# Altium footprint library 2.11-TQFP封装.PcbLib: 71 footprints (part 2 of 5)
Each footprint in its own frame and in the unit in brackets; x right, y up, seen from the top. Pads: shape width x height; smd on the part's side, far side on the other; paste and mask are expansions set on the pad; w line width, h text height; cw(c..) or ccw(c..) is an arc to the next point about the centre after c.
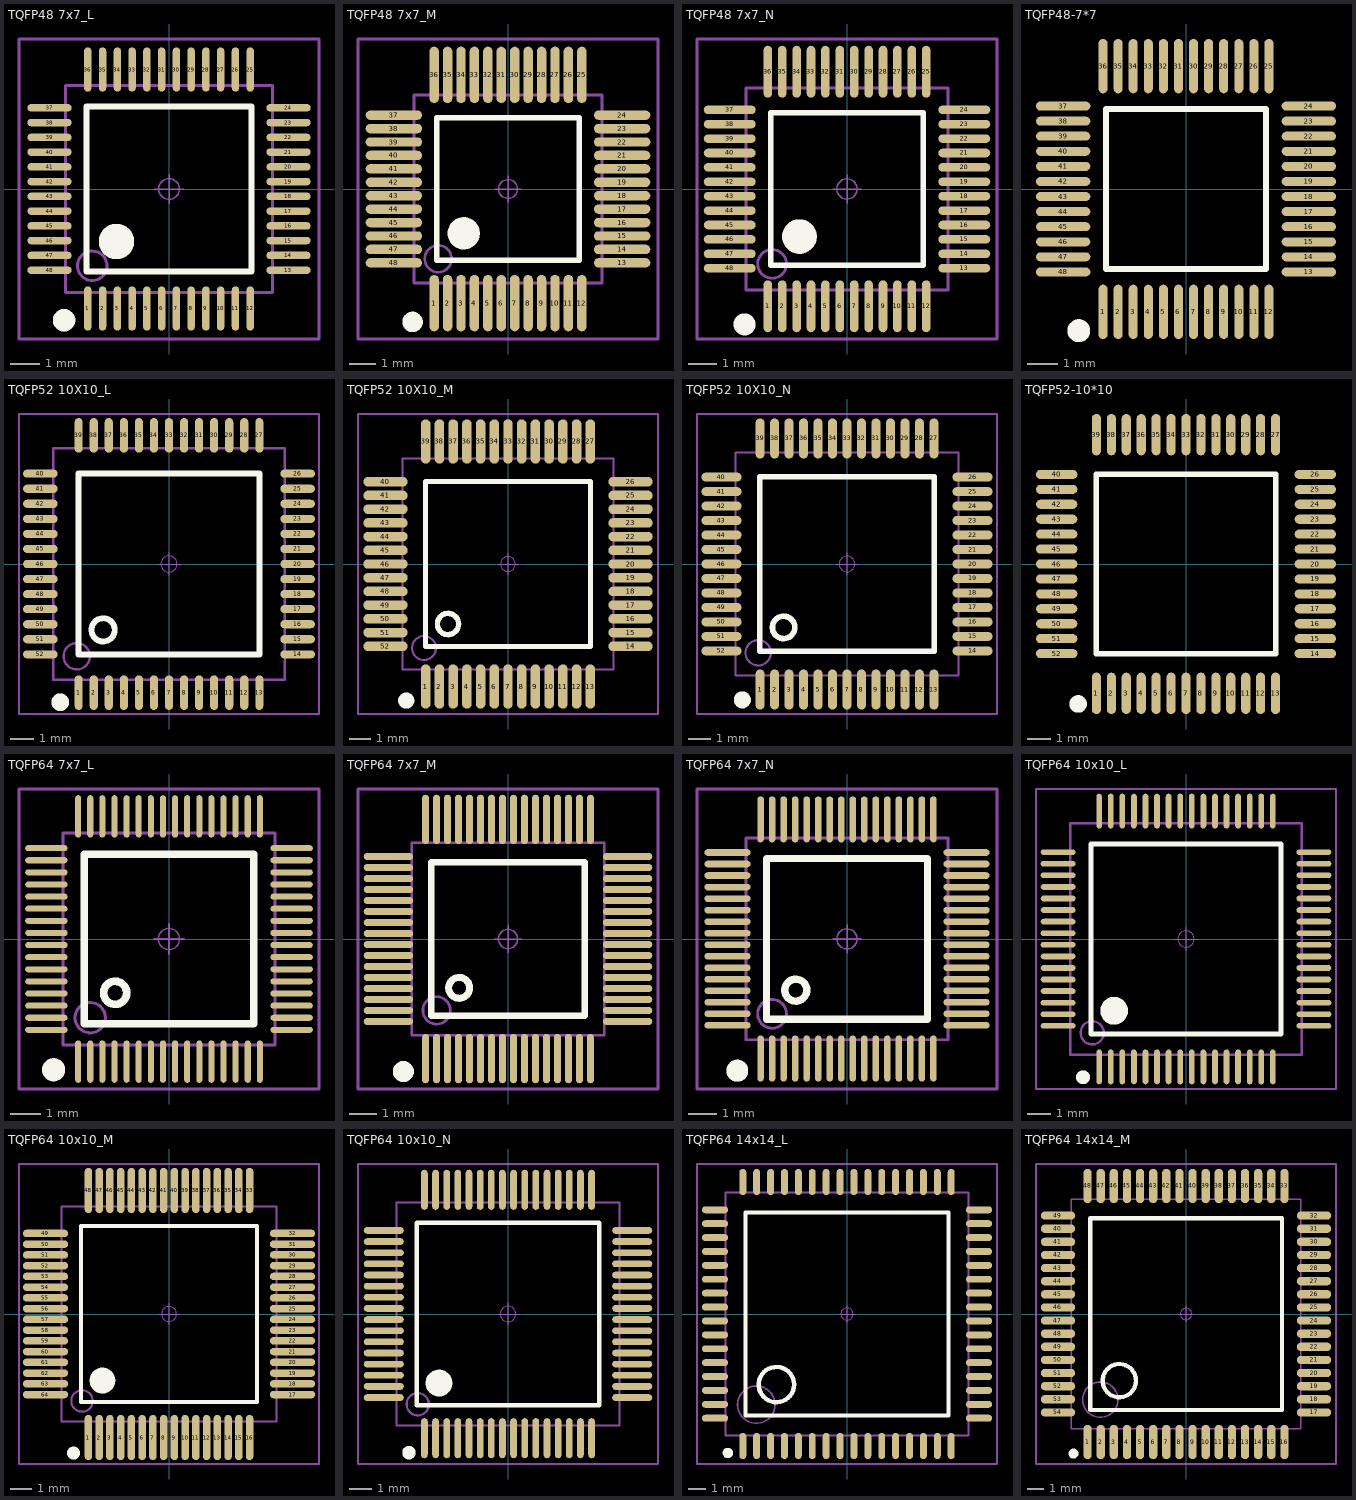
[diagram p1: the footprints below, top view; thin cyan lines are the x and y axes]

## TQFP48 7x7_L [mm] "48脚，体宽：7x7mm, 脚距：0.5mm"
height 1.6
pads (48):
  oval 0.25x1.5 smd: 1(-2.75,-4.046) 2(-2.25,-4.046) 3(-1.75,-4.046) 4(-1.25,-4.046) 5(-0.75,-4.046) 6(-0.25,-4.046) 7(0.25,-4.046) 8(0.75,-4.046) 9(1.25,-4.046) 10(1.75,-4.046) 11(2.25,-4.046) 12(2.75,-4.046) 25(2.75,4.046) 26(2.25,4.046) 27(1.75,4.046) 28(1.25,4.046) 29(0.75,4.046) 30(0.25,4.046) 31(-0.25,4.046) 32(-0.75,4.046) 33(-1.25,4.046) 34(-1.75,4.046) 35(-2.25,4.046) 36(-2.75,4.046)
  oval 1.5x0.25 smd: 13(4.046,-2.75) 14(4.046,-2.25) 15(4.046,-1.75) 16(4.046,-1.25) 17(4.046,-0.75) 18(4.046,-0.25) 19(4.046,0.25) 20(4.046,0.75) 21(4.046,1.25) 22(4.046,1.75) 23(4.046,2.25) 24(4.046,2.75) 37(-4.046,2.75) 38(-4.046,2.25) 39(-4.046,1.75) 40(-4.046,1.25) 41(-4.046,0.75) 42(-4.046,0.25) 43(-4.046,-0.25) 44(-4.046,-0.75) 45(-4.046,-1.25) 46(-4.046,-1.75) 47(-4.046,-2.25) 48(-4.046,-2.75)
Top Overlay:
  circle w0.6: c-1.778,-1.778 r0.3
  circle w0.508: c-3.556,-4.445 r0.127
  lines w0.2: -2.794,-2.794 2.794,-2.794 2.794,2.794 -2.794,2.794 -2.794,-2.794
Mechanical 13:
  circle w0.1: c-2.6,-2.6 r0.5
  lines w0.1: -3.5,-3.5 3.5,-3.5 3.5,3.5 -3.5,3.5 -3.5,-3.5
Mechanical 15:
  circle w0.05: c0,0 r0.35
  lines w0.05: -0.5,0 0.5,0 ; 0,-0.5 0,0.5
  lines w0.1: -5.08,-5.08 5.08,-5.08 5.08,5.08 -5.08,5.08 -5.08,-5.08
3D body "TQFP48 7x7.STEP": height 1.05, standoff 0, extent -4.502,-4.502 4.502,4.502

## TQFP48 7x7_M [mm] "48脚，体宽：7x7mm, 脚距：0.5mm  淘宝ID:黄晶宝石"
height 1.6
pads (48):
  oval 0.35x2.1 smd: 1(-2.75,-4.251) 2(-2.25,-4.251) 3(-1.75,-4.251) 4(-1.25,-4.251) 5(-0.75,-4.251) 6(-0.25,-4.251) 7(0.25,-4.251) 8(0.75,-4.251) 9(1.25,-4.251) 10(1.75,-4.251) 11(2.25,-4.251) 12(2.75,-4.251) 25(2.75,4.251) 26(2.25,4.251) 27(1.75,4.251) 28(1.25,4.251) 29(0.75,4.251) 30(0.25,4.251) 31(-0.25,4.251) 32(-0.75,4.251) 33(-1.25,4.251) 34(-1.75,4.251) 35(-2.25,4.251) 36(-2.75,4.251)
  oval 2.1x0.35 smd: 13(4.251,-2.75) 14(4.251,-2.25) 15(4.251,-1.75) 16(4.251,-1.25) 17(4.251,-0.75) 18(4.251,-0.25) 19(4.251,0.25) 20(4.251,0.75) 21(4.251,1.25) 22(4.251,1.75) 23(4.251,2.25) 24(4.251,2.75) 37(-4.251,2.75) 38(-4.251,2.25) 39(-4.251,1.75) 40(-4.251,1.25) 41(-4.251,0.75) 42(-4.251,0.25) 43(-4.251,-0.25) 44(-4.251,-0.75) 45(-4.251,-1.25) 46(-4.251,-1.75) 47(-4.251,-2.25) 48(-4.251,-2.75)
Top Overlay:
  circle w0.508: c-3.556,-4.953 r0.127
  circle w0.6: c-1.65,-1.65 r0.3
  lines w0.2: -2.65,-2.65 2.65,-2.65 2.65,2.65 -2.65,2.65 -2.65,-2.65
Mechanical 13:
  circle w0.1: c-2.6,-2.6 r0.5
  lines w0.1: -3.5,-3.5 3.5,-3.5 3.5,3.5 -3.5,3.5 -3.5,-3.5
Mechanical 15:
  circle w0.05: c0,0 r0.35
  lines w0.05: -0.5,0 0.5,0 ; 0,-0.5 0,0.5
  lines w0.1: -5.588,-5.588 5.588,-5.588 5.588,5.588 -5.588,5.588 -5.588,-5.588
3D body "TQFP48 7x7.STEP": height 1.05, standoff 0, extent -4.502,-4.502 4.502,4.502

## TQFP48 7x7_N [mm] "48脚，体宽：7x7mm, 脚距：0.5mm"
height 1.6
pads (48):
  oval 0.3x1.8 smd: 1(-2.75,-4.073) 2(-2.25,-4.073) 3(-1.75,-4.073) 4(-1.25,-4.073) 5(-0.75,-4.073) 6(-0.25,-4.073) 7(0.25,-4.073) 8(0.75,-4.073) 9(1.25,-4.073) 10(1.75,-4.073) 11(2.25,-4.073) 12(2.75,-4.073) 25(2.75,4.073) 26(2.25,4.073) 27(1.75,4.073) 28(1.25,4.073) 29(0.75,4.073) 30(0.25,4.073) 31(-0.25,4.073) 32(-0.75,4.073) 33(-1.25,4.073) 34(-1.75,4.073) 35(-2.25,4.073) 36(-2.75,4.073)
  oval 1.8x0.3 smd: 13(4.073,-2.75) 14(4.073,-2.25) 15(4.073,-1.75) 16(4.073,-1.25) 17(4.073,-0.75) 18(4.073,-0.25) 19(4.073,0.25) 20(4.073,0.75) 21(4.073,1.25) 22(4.073,1.75) 23(4.073,2.25) 24(4.073,2.75) 37(-4.073,2.75) 38(-4.073,2.25) 39(-4.073,1.75) 40(-4.073,1.25) 41(-4.073,0.75) 42(-4.073,0.25) 43(-4.073,-0.25) 44(-4.073,-0.75) 45(-4.073,-1.25) 46(-4.073,-1.75) 47(-4.073,-2.25) 48(-4.073,-2.75)
Top Overlay:
  circle w0.508: c-3.556,-4.699 r0.127
  circle w0.6: c-1.65,-1.65 r0.3
  lines w0.2: -2.65,-2.65 -2.65,2.65 2.65,2.65 2.65,-2.65 -2.65,-2.65
Mechanical 13:
  circle w0.1: c-2.6,-2.6 r0.5
  lines w0.1: -3.5,-3.5 -3.5,3.5 3.5,3.5 3.5,-3.5 -3.5,-3.5
Mechanical 15:
  circle w0.05: c0,0 r0.35
  lines w0.05: -0.5,0 0.5,0 ; 0,-0.5 0,0.5
  lines w0.1: -5.207,-5.207 -5.207,5.207 5.207,5.207 5.207,-5.207 -5.207,-5.207
3D body "TQFP48 7x7.STEP": height 1.05, standoff 0, extent -4.502,-4.502 4.502,4.502

## TQFP48-7*7 [mm] "7x7mm, 0.5mm       封装库来自淘宝卖家 ID：黄晶宝石"
pads (48):
  oval 0.3x1.8 smd: 1(-2.75,-4.073) 2(-2.25,-4.073) 3(-1.75,-4.073) 4(-1.25,-4.073) 5(-0.75,-4.073) 6(-0.25,-4.073) 7(0.25,-4.073) 8(0.75,-4.073) 9(1.25,-4.073) 10(1.75,-4.073) 11(2.25,-4.073) 12(2.75,-4.073) 25(2.75,4.073) 26(2.25,4.073) 27(1.75,4.073) 28(1.25,4.073) 29(0.75,4.073) 30(0.25,4.073) 31(-0.25,4.073) 32(-0.75,4.073) 33(-1.25,4.073) 34(-1.75,4.073) 35(-2.25,4.073) 36(-2.75,4.073)
  oval 1.8x0.3 smd: 13(4.073,-2.75) 14(4.073,-2.25) 15(4.073,-1.75) 16(4.073,-1.25) 17(4.073,-0.75) 18(4.073,-0.25) 19(4.073,0.25) 20(4.073,0.75) 21(4.073,1.25) 22(4.073,1.75) 23(4.073,2.25) 24(4.073,2.75) 37(-4.073,2.75) 38(-4.073,2.25) 39(-4.073,1.75) 40(-4.073,1.25) 41(-4.073,0.75) 42(-4.073,0.25) 43(-4.073,-0.25) 44(-4.073,-0.75) 45(-4.073,-1.25) 46(-4.073,-1.75) 47(-4.073,-2.25) 48(-4.073,-2.75)
Top Overlay:
  circle w0.508: c-3.556,-4.699 r0.127
  lines w0.2: -2.65,-2.65 -2.65,2.65 2.65,2.65 2.65,-2.65 -2.65,-2.65
3D body "TQFP48_7x7.STEP": height 1.05, standoff 0, extent -4.502,-4.502 4.502,4.502

## TQFP52 10X10_L [mm] "52脚，体宽：10x10mm, 脚距：0.65mm  淘宝ID:黄晶宝石"
pads (52):
  oval 0.35x1.5 smd: 1(-3.9,-5.556) 2(-3.25,-5.556) 3(-2.6,-5.556) 4(-1.95,-5.556) 5(-1.3,-5.556) 6(-0.65,-5.556) 7(0,-5.556) 8(0.65,-5.556) 9(1.3,-5.556) 10(1.95,-5.556) 11(2.6,-5.556) 12(3.25,-5.556) 13(3.9,-5.556) 27(3.9,5.556) 28(3.25,5.556) 29(2.6,5.556) 30(1.95,5.556) 31(1.3,5.556) 32(0.65,5.556) 33(0,5.556) 34(-0.65,5.556) 35(-1.3,5.556) 36(-1.95,5.556) 37(-2.6,5.556) 38(-3.25,5.556) 39(-3.9,5.556)
  oval 1.5x0.35 smd: 14(5.556,-3.9) 15(5.556,-3.25) 16(5.556,-2.6) 17(5.556,-1.95) 18(5.556,-1.3) 19(5.556,-0.65) 20(5.556,0) 21(5.556,0.65) 22(5.556,1.3) 23(5.556,1.95) 24(5.556,2.6) 25(5.556,3.25) 26(5.556,3.9) 40(-5.556,3.9) 41(-5.556,3.25) 42(-5.556,2.6) 43(-5.556,1.95) 44(-5.556,1.3) 45(-5.556,0.65) 46(-5.556,0) 47(-5.556,-0.65) 48(-5.556,-1.3) 49(-5.556,-1.95) 50(-5.556,-2.6) 51(-5.556,-3.25) 52(-5.556,-3.9)
Top Overlay:
  circle w0.508: c-4.699,-5.969 r0.127
  circle w0.254: c-2.845,-2.845 r0.503
  lines w0.254: -3.912,-3.912 3.912,-3.912 3.912,3.912 -3.912,3.912 -3.912,-3.912
Mechanical 13:
  circle w0.1: c-3.984,-3.984 r0.568
  lines w0.1: -5,-5 -5,5 5,5 5,-5 -5,-5
Mechanical 15:
  circle w0.05: c0,0 r0.35
  lines w0.05: -0.5,0 0.5,0 ; 0,-0.5 0,0.5
  lines w0.1: -6.477,-6.477 6.477,-6.477 6.477,6.477 -6.477,6.477 -6.477,-6.477
3D body "TQFP52 10x10.STEP": height 1.05, standoff -0.01, extent -6.002,-6.002 6.002,6.002

## TQFP52 10X10_M [mm] "52脚，体宽：10x10mm, 脚距：0.65mm"
pads (52):
  oval 0.45x2.1 smd: 1(-3.9,-5.81) 2(-3.25,-5.81) 3(-2.6,-5.81) 4(-1.95,-5.81) 5(-1.3,-5.81) 6(-0.65,-5.81) 7(0,-5.81) 8(0.65,-5.81) 9(1.3,-5.81) 10(1.95,-5.81) 11(2.6,-5.81) 12(3.25,-5.81) 13(3.9,-5.81) 27(3.9,5.81) 28(3.25,5.81) 29(2.6,5.81) 30(1.95,5.81) 31(1.3,5.81) 32(0.65,5.81) 33(0,5.81) 34(-0.65,5.81) 35(-1.3,5.81) 36(-1.95,5.81) 37(-2.6,5.81) 38(-3.25,5.81) 39(-3.9,5.81)
  oval 2.1x0.45 smd: 14(5.81,-3.9) 15(5.81,-3.25) 16(5.81,-2.6) 17(5.81,-1.95) 18(5.81,-1.3) 19(5.81,-0.65) 20(5.81,0) 21(5.81,0.65) 22(5.81,1.3) 23(5.81,1.95) 24(5.81,2.6) 25(5.81,3.25) 26(5.81,3.9) 40(-5.81,3.9) 41(-5.81,3.25) 42(-5.81,2.6) 43(-5.81,1.95) 44(-5.81,1.3) 45(-5.81,0.65) 46(-5.81,0) 47(-5.81,-0.65) 48(-5.81,-1.3) 49(-5.81,-1.95) 50(-5.81,-2.6) 51(-5.81,-3.25) 52(-5.81,-3.9)
Top Overlay:
  circle w0.254: c-2.845,-2.845 r0.503
  circle w0.508: c-4.826,-6.477 r0.127
  lines w0.254: -3.912,-3.912 -3.912,3.912 3.912,3.912 3.912,-3.912 -3.912,-3.912
Mechanical 13:
  circle w0.1: c-3.984,-3.984 r0.568
  lines w0.1: -5,-5 5,-5 5,5 -5,5 -5,-5
Mechanical 15:
  circle w0.05: c0,0 r0.35
  lines w0.05: -0.5,0 0.5,0 ; 0,-0.5 0,0.5
  lines w0.1: -7.112,-7.112 -7.112,7.112 7.112,7.112 7.112,-7.112 -7.112,-7.112
3D body "TQFP52 10x10.STEP": height 1.05, standoff -0.01, extent -6.002,-6.002 6.002,6.002

## TQFP52 10X10_N [mm] "52脚，体宽：10x10mm, 脚距：0.65mm"
pads (52):
  oval 0.4x1.8 smd: 1(-3.9,-5.632) 2(-3.25,-5.632) 3(-2.6,-5.632) 4(-1.95,-5.632) 5(-1.3,-5.632) 6(-0.65,-5.632) 7(0,-5.632) 8(0.65,-5.632) 9(1.3,-5.632) 10(1.95,-5.632) 11(2.6,-5.632) 12(3.25,-5.632) 13(3.9,-5.632) 27(3.9,5.632) 28(3.25,5.632) 29(2.6,5.632) 30(1.95,5.632) 31(1.3,5.632) 32(0.65,5.632) 33(0,5.632) 34(-0.65,5.632) 35(-1.3,5.632) 36(-1.95,5.632) 37(-2.6,5.632) 38(-3.25,5.632) 39(-3.9,5.632)
  oval 1.8x0.4 smd: 14(5.632,-3.9) 15(5.632,-3.25) 16(5.632,-2.6) 17(5.632,-1.95) 18(5.632,-1.3) 19(5.632,-0.65) 20(5.632,0) 21(5.632,0.65) 22(5.632,1.3) 23(5.632,1.95) 24(5.632,2.6) 25(5.632,3.25) 26(5.632,3.9) 40(-5.632,3.9) 41(-5.632,3.25) 42(-5.632,2.6) 43(-5.632,1.95) 44(-5.632,1.3) 45(-5.632,0.65) 46(-5.632,0) 47(-5.632,-0.65) 48(-5.632,-1.3) 49(-5.632,-1.95) 50(-5.632,-2.6) 51(-5.632,-3.25) 52(-5.632,-3.9)
Top Overlay:
  circle w0.254: c-2.845,-2.845 r0.503
  circle w0.508: c-4.699,-6.096 r0.127
  lines w0.254: -3.912,-3.912 -3.912,3.912 3.912,3.912 3.912,-3.912 -3.912,-3.912
Mechanical 13:
  circle w0.1: c-3.984,-3.984 r0.568
  lines w0.1: -5,-5 5,-5 5,5 -5,5 -5,-5
Mechanical 15:
  circle w0.05: c0,0 r0.35
  lines w0.05: -0.5,0 0.5,0 ; 0,-0.5 0,0.5
  lines w0.1: -6.731,-6.731 -6.731,6.731 6.731,6.731 6.731,-6.731 -6.731,-6.731
3D body "TQFP52 10x10.STEP": height 1.05, standoff -0.01, extent -6.002,-6.002 6.002,6.002

## TQFP52-10*10 [mm] "10x10mm, 0.65mm     封装库来自淘宝卖家 ID：黄晶宝石"
pads (52):
  oval 0.4x1.8 smd: 1(-3.9,-5.632) 2(-3.25,-5.632) 3(-2.6,-5.632) 4(-1.95,-5.632) 5(-1.3,-5.632) 6(-0.65,-5.632) 7(0,-5.632) 8(0.65,-5.632) 9(1.3,-5.632) 10(1.95,-5.632) 11(2.6,-5.632) 12(3.25,-5.632) 13(3.9,-5.632) 27(3.9,5.632) 28(3.25,5.632) 29(2.6,5.632) 30(1.95,5.632) 31(1.3,5.632) 32(0.65,5.632) 33(0,5.632) 34(-0.65,5.632) 35(-1.3,5.632) 36(-1.95,5.632) 37(-2.6,5.632) 38(-3.25,5.632) 39(-3.9,5.632)
  oval 1.8x0.4 smd: 14(5.632,-3.9) 15(5.632,-3.25) 16(5.632,-2.6) 17(5.632,-1.95) 18(5.632,-1.3) 19(5.632,-0.65) 20(5.632,0) 21(5.632,0.65) 22(5.632,1.3) 23(5.632,1.95) 24(5.632,2.6) 25(5.632,3.25) 26(5.632,3.9) 40(-5.632,3.9) 41(-5.632,3.25) 42(-5.632,2.6) 43(-5.632,1.95) 44(-5.632,1.3) 45(-5.632,0.65) 46(-5.632,0) 47(-5.632,-0.65) 48(-5.632,-1.3) 49(-5.632,-1.95) 50(-5.632,-2.6) 51(-5.632,-3.25) 52(-5.632,-3.9)
Top Overlay:
  circle w0.508: c-4.699,-6.096 r0.127
  lines w0.254: -3.912,-3.912 -3.912,3.912 3.912,3.912 3.912,-3.912 -3.912,-3.912
3D body "TQFP52_10x10.STEP": height 1.05, standoff 0, extent -6.002,-6.002 6.002,6.002

## TQFP64 7x7_L [mm] "64脚，体宽：7x7mm, 脚距：0.4mm"
pads (64):
  oval 0.2x1.4 smd: 1(-3,-4.048) 2(-2.6,-4.048) 3(-2.2,-4.048) 4(-1.8,-4.048) 5(-1.4,-4.048) 6(-1,-4.048) 7(-0.6,-4.048) 8(-0.2,-4.048) 9(0.2,-4.048) 10(0.6,-4.048) 11(1,-4.048) 12(1.4,-4.048) 13(1.8,-4.048) 14(2.2,-4.048) 15(2.6,-4.048) 16(3,-4.048) 33(3,4.048) 34(2.6,4.048) 35(2.2,4.048) 36(1.8,4.048) 37(1.4,4.048) 38(1,4.048) 39(0.6,4.048) 40(0.2,4.048) 41(-0.2,4.048) 42(-0.6,4.048) 43(-1,4.048) 44(-1.4,4.048) 45(-1.8,4.048) 46(-2.2,4.048) 47(-2.6,4.048) 48(-3,4.048)
  oval 1.4x0.2 smd: 17(4.048,-3) 18(4.048,-2.6) 19(4.048,-2.2) 20(4.048,-1.8) 21(4.048,-1.4) 22(4.048,-1) 23(4.048,-0.6) 24(4.048,-0.2) 25(4.048,0.2) 26(4.048,0.6) 27(4.048,1) 28(4.048,1.4) 29(4.048,1.8) 30(4.048,2.2) 31(4.048,2.6) 32(4.048,3) 49(-4.048,3) 50(-4.048,2.6) 51(-4.048,2.2) 52(-4.048,1.8) 53(-4.048,1.4) 54(-4.048,1) 55(-4.048,0.6) 56(-4.048,0.2) 57(-4.048,-0.2) 58(-4.048,-0.6) 59(-4.048,-1) 60(-4.048,-1.4) 61(-4.048,-1.8) 62(-4.048,-2.2) 63(-4.048,-2.6) 64(-4.048,-3)
Top Overlay:
  circle w0.254: c-1.778,-1.778 r0.381
  circle w0.508: c-3.81,-4.318 r0.127
  lines w0.254: -2.794,-2.794 2.794,-2.794 2.794,2.794 -2.794,2.794 -2.794,-2.794
Mechanical 13:
  circle w0.1: c-2.6,-2.6 r0.5
  lines w0.1: -3.5,-3.5 3.5,-3.5 3.5,3.5 -3.5,3.5 -3.5,-3.5
Mechanical 15:
  circle w0.05: c0,0 r0.35
  lines w0.05: -0.5,0 0.5,0 ; 0,-0.5 0,0.5
  lines w0.1: -4.953,-4.953 -4.953,4.953 4.953,4.953 4.953,-4.953 -4.953,-4.953
3D body "TQFP64 7x7.STEP": height 1.05, standoff 0, extent -4.502,-4.502 4.502,4.502

## TQFP64 7x7_M [mm] "64脚，体宽：7x7mm, 脚距：0.4mm  淘宝ID:黄晶宝石"
pads (64):
  oval 0.26x1.8 smd: 1(-3,-4.352) 2(-2.6,-4.352) 3(-2.2,-4.352) 4(-1.8,-4.352) 5(-1.4,-4.352) 6(-1,-4.352) 7(-0.6,-4.352) 8(-0.2,-4.352) 9(0.2,-4.352) 10(0.6,-4.352) 11(1,-4.352) 12(1.4,-4.352) 13(1.8,-4.352) 14(2.2,-4.352) 15(2.6,-4.352) 16(3,-4.352) 33(3,4.352) 34(2.6,4.352) 35(2.2,4.352) 36(1.8,4.352) 37(1.4,4.352) 38(1,4.352) 39(0.6,4.352) 40(0.2,4.352) 41(-0.2,4.352) 42(-0.6,4.352) 43(-1,4.352) 44(-1.4,4.352) 45(-1.8,4.352) 46(-2.2,4.352) 47(-2.6,4.352) 48(-3,4.352)
  oval 1.8x0.26 smd: 17(4.352,-3) 18(4.352,-2.6) 19(4.352,-2.2) 20(4.352,-1.8) 21(4.352,-1.4) 22(4.352,-1) 23(4.352,-0.6) 24(4.352,-0.2) 25(4.352,0.2) 26(4.352,0.6) 27(4.352,1) 28(4.352,1.4) 29(4.352,1.8) 30(4.352,2.2) 31(4.352,2.6) 32(4.352,3) 49(-4.352,3) 50(-4.352,2.6) 51(-4.352,2.2) 52(-4.352,1.8) 53(-4.352,1.4) 54(-4.352,1) 55(-4.352,0.6) 56(-4.352,0.2) 57(-4.352,-0.2) 58(-4.352,-0.6) 59(-4.352,-1) 60(-4.352,-1.4) 61(-4.352,-1.8) 62(-4.352,-2.2) 63(-4.352,-2.6) 64(-4.352,-3)
Top Overlay:
  circle w0.254: c-1.778,-1.778 r0.381
  circle w0.508: c-3.81,-4.826 r0.127
  lines w0.254: -2.794,-2.794 2.794,-2.794 2.794,2.794 -2.794,2.794 -2.794,-2.794
Mechanical 13:
  circle w0.1: c-2.6,-2.6 r0.5
  lines w0.1: -3.5,-3.5 3.5,-3.5 3.5,3.5 -3.5,3.5 -3.5,-3.5
Mechanical 15:
  circle w0.05: c0,0 r0.35
  lines w0.05: -0.5,0 0.5,0 ; 0,-0.5 0,0.5
  lines w0.1: -5.461,-5.461 -5.461,5.461 5.461,5.461 5.461,-5.461 -5.461,-5.461
3D body "TQFP64 7x7.STEP": height 1.05, standoff 0, extent -4.502,-4.502 4.502,4.502

## TQFP64 7x7_N [mm] "64脚，体宽：7x7mm, 脚距：0.4mm"
pads (64):
  oval 0.23x1.6 smd: 1(-3,-4.146) 2(-2.6,-4.146) 3(-2.2,-4.146) 4(-1.8,-4.146) 5(-1.4,-4.146) 6(-1,-4.146) 7(-0.6,-4.146) 8(-0.2,-4.146) 9(0.2,-4.146) 10(0.6,-4.146) 11(1,-4.146) 12(1.4,-4.146) 13(1.8,-4.146) 14(2.2,-4.146) 15(2.6,-4.146) 16(3,-4.146) 33(3,4.152) 34(2.6,4.152) 35(2.2,4.152) 36(1.8,4.152) 37(1.4,4.152) 38(1,4.152) 39(0.6,4.152) 40(0.2,4.152) 41(-0.2,4.152) 42(-0.6,4.152) 43(-1,4.152) 44(-1.4,4.152) 45(-1.8,4.152) 46(-2.2,4.152) 47(-2.6,4.152) 48(-3,4.152)
  oval 1.6x0.23 smd: 17(4.149,-2.997) 18(4.149,-2.597) 19(4.149,-2.197) 20(4.149,-1.797) 21(4.149,-1.397) 22(4.149,-0.997) 23(4.149,-0.597) 24(4.149,-0.197) 25(4.149,0.203) 26(4.149,0.603) 27(4.149,1.003) 28(4.149,1.403) 29(4.149,1.803) 30(4.149,2.203) 31(4.149,2.603) 32(4.149,3.003) 49(-4.149,3.003) 50(-4.149,2.603) 51(-4.149,2.203) 52(-4.149,1.803) 53(-4.149,1.403) 54(-4.149,1.003) 55(-4.149,0.603) 56(-4.149,0.203) 57(-4.149,-0.197) 58(-4.149,-0.597) 59(-4.149,-0.997) 60(-4.149,-1.397) 61(-4.149,-1.797) 62(-4.149,-2.197) 63(-4.149,-2.597) 64(-4.149,-2.997)
Top Overlay:
  circle w0.508: c-3.81,-4.572 r0.127
  circle w0.254: c-1.778,-1.775 r0.381
  lines w0.254: -2.794,-2.791 -2.794,2.797 2.794,2.797 2.794,-2.791 -2.794,-2.791
Mechanical 13:
  circle w0.1: c-2.6,-2.597 r0.5
  lines w0.1: -3.5,-3.497 -3.5,3.503 3.5,3.503 3.5,-3.497 -3.5,-3.497
Mechanical 15:
  circle w0.05: c0,0.003 r0.35
  lines w0.05: -0.5,0.003 0.5,0.003 ; 0,-0.497 0,0.503
  lines w0.1: -5.207,-5.207 5.207,-5.207 5.207,5.207 -5.207,5.207 -5.207,-5.207
3D body "TQFP64 7x7.STEP": height 1.05, standoff 0, extent -4.502,-4.499 4.502,4.505

## TQFP64 10x10_L [mm] "64脚，体宽：10x10mm, 脚距：0.5mm"
pads (64):
  oval 0.25x1.5 smd: 1(-3.75,-5.523) 2(-3.25,-5.523) 3(-2.75,-5.523) 4(-2.25,-5.523) 5(-1.75,-5.523) 6(-1.25,-5.523) 7(-0.75,-5.523) 8(-0.25,-5.523) 9(0.25,-5.523) 10(0.75,-5.523) 11(1.25,-5.523) 12(1.75,-5.523) 13(2.25,-5.523) 14(2.75,-5.523) 15(3.25,-5.523) 16(3.75,-5.523) 33(3.75,5.523) 34(3.25,5.523) 35(2.75,5.523) 36(2.25,5.523) 37(1.75,5.523) 38(1.25,5.523) 39(0.75,5.523) 40(0.25,5.523) 41(-0.25,5.523) 42(-0.75,5.523) 43(-1.25,5.523) 44(-1.75,5.523) 45(-2.25,5.523) 46(-2.75,5.523) 47(-3.25,5.523) 48(-3.75,5.523)
  oval 1.5x0.25 smd: 17(5.523,-3.75) 18(5.523,-3.25) 19(5.523,-2.75) 20(5.523,-2.25) 21(5.523,-1.75) 22(5.523,-1.25) 23(5.523,-0.75) 24(5.523,-0.25) 25(5.523,0.25) 26(5.523,0.75) 27(5.523,1.25) 28(5.523,1.75) 29(5.523,2.25) 30(5.523,2.75) 31(5.523,3.25) 32(5.523,3.75) 49(-5.523,3.75) 50(-5.523,3.25) 51(-5.523,2.75) 52(-5.523,2.25) 53(-5.523,1.75) 54(-5.523,1.25) 55(-5.523,0.75) 56(-5.523,0.25) 57(-5.523,-0.25) 58(-5.523,-0.75) 59(-5.523,-1.25) 60(-5.523,-1.75) 61(-5.523,-2.25) 62(-5.523,-2.75) 63(-5.523,-3.25) 64(-5.523,-3.75)
Top Overlay:
  circle w0.6: c-3.1,-3.1 r0.3
  circle w0.35: c-4.445,-5.969 r0.125
  lines w0.2: -4.1,-4.1 -4.1,4.1 4.1,4.1 4.1,-4.1 -4.1,-4.1
Mechanical 13:
  circle w0.1: c-4.05,-4.05 r0.5
  lines w0.1: -5,-5 -5,5 5,5 5,-5 -5,-5
Mechanical 15:
  circle w0.05: c0,0 r0.35
  lines w0.05: -0.5,0 0.5,0 ; 0,-0.5 0,0.5
  lines w0.1: -6.477,-6.477 -6.477,6.477 6.477,6.477 6.477,-6.477 -6.477,-6.477
3D body "TQFP64 10x10.STEP": height 1.05, standoff -0.01, extent -5.997,-6.002 6.008,6.002

## TQFP64 10x10_M [mm] "64脚，体宽：10x10mm, 脚距：0.5mm  淘宝ID:黄晶宝石"
pads (64):
  oval 0.35x2.1 smd: 1(-3.75,-5.752) 2(-3.25,-5.752) 3(-2.75,-5.752) 4(-2.25,-5.752) 5(-1.75,-5.752) 6(-1.25,-5.752) 7(-0.75,-5.752) 8(-0.25,-5.752) 9(0.25,-5.752) 10(0.75,-5.752) 11(1.25,-5.752) 12(1.75,-5.752) 13(2.25,-5.752) 14(2.75,-5.752) 15(3.25,-5.752) 16(3.75,-5.752) 33(3.75,5.752) 34(3.25,5.752) 35(2.75,5.752) 36(2.25,5.752) 37(1.75,5.752) 38(1.25,5.752) 39(0.75,5.752) 40(0.25,5.752) 41(-0.25,5.752) 42(-0.75,5.752) 43(-1.25,5.752) 44(-1.75,5.752) 45(-2.25,5.752) 46(-2.75,5.752) 47(-3.25,5.752) 48(-3.75,5.752)
  oval 2.1x0.35 smd: 17(5.752,-3.75) 18(5.752,-3.25) 19(5.752,-2.75) 20(5.752,-2.25) 21(5.752,-1.75) 22(5.752,-1.25) 23(5.752,-0.75) 24(5.752,-0.25) 25(5.752,0.25) 26(5.752,0.75) 27(5.752,1.25) 28(5.752,1.75) 29(5.752,2.25) 30(5.752,2.75) 31(5.752,3.25) 32(5.752,3.75) 49(-5.752,3.75) 50(-5.752,3.25) 51(-5.752,2.75) 52(-5.752,2.25) 53(-5.752,1.75) 54(-5.752,1.25) 55(-5.752,0.75) 56(-5.752,0.25) 57(-5.752,-0.25) 58(-5.752,-0.75) 59(-5.752,-1.25) 60(-5.752,-1.75) 61(-5.752,-2.25) 62(-5.752,-2.75) 63(-5.752,-3.25) 64(-5.752,-3.75)
Top Overlay:
  circle w0.6: c-3.1,-3.1 r0.3
  circle w0.35: c-4.445,-6.477 r0.125
  lines w0.2: -4.1,-4.1 -4.1,4.1 4.1,4.1 4.1,-4.1 -4.1,-4.1
Mechanical 13:
  circle w0.1: c-4.05,-4.05 r0.5
  lines w0.1: -5,-5 -5,5 5,5 5,-5 -5,-5
Mechanical 15:
  circle w0.05: c0,0 r0.35
  lines w0.05: -0.5,0 0.5,0 ; 0,-0.5 0,0.5
  lines w0.1: -6.985,-6.985 -6.985,6.985 6.985,6.985 6.985,-6.985 -6.985,-6.985
3D body "TQFP64 10x10.STEP": height 1.05, standoff -0.01, extent -5.997,-6.002 6.008,6.002

## TQFP64 10x10_N [mm] "64脚，体宽：10x10mm, 脚距：0.5mm"
pads (64):
  oval 0.3x1.8 smd: 1(-3.75,-5.574) 2(-3.25,-5.574) 3(-2.75,-5.574) 4(-2.25,-5.574) 5(-1.75,-5.574) 6(-1.25,-5.574) 7(-0.75,-5.574) 8(-0.25,-5.574) 9(0.25,-5.574) 10(0.75,-5.574) 11(1.25,-5.574) 12(1.75,-5.574) 13(2.25,-5.574) 14(2.75,-5.574) 15(3.25,-5.574) 16(3.75,-5.574) 33(3.75,5.574) 34(3.25,5.574) 35(2.75,5.574) 36(2.25,5.574) 37(1.75,5.574) 38(1.25,5.574) 39(0.75,5.574) 40(0.25,5.574) 41(-0.25,5.574) 42(-0.75,5.574) 43(-1.25,5.574) 44(-1.75,5.574) 45(-2.25,5.574) 46(-2.75,5.574) 47(-3.25,5.574) 48(-3.75,5.574)
  oval 1.8x0.3 smd: 17(5.574,-3.75) 18(5.574,-3.25) 19(5.574,-2.75) 20(5.574,-2.25) 21(5.574,-1.75) 22(5.574,-1.25) 23(5.574,-0.75) 24(5.574,-0.25) 25(5.574,0.25) 26(5.574,0.75) 27(5.574,1.25) 28(5.574,1.75) 29(5.574,2.25) 30(5.574,2.75) 31(5.574,3.25) 32(5.574,3.75) 49(-5.574,3.75) 50(-5.574,3.25) 51(-5.574,2.75) 52(-5.574,2.25) 53(-5.574,1.75) 54(-5.574,1.25) 55(-5.574,0.75) 56(-5.574,0.25) 57(-5.574,-0.25) 58(-5.574,-0.75) 59(-5.574,-1.25) 60(-5.574,-1.75) 61(-5.574,-2.25) 62(-5.574,-2.75) 63(-5.574,-3.25) 64(-5.574,-3.75)
Top Overlay:
  circle w0.6: c-3.1,-3.1 r0.3
  circle w0.35: c-4.445,-6.223 r0.125
  lines w0.2: -4.1,-4.1 -4.1,4.1 4.1,4.1 4.1,-4.1 -4.1,-4.1
Mechanical 13:
  circle w0.1: c-4.05,-4.05 r0.5
  lines w0.1: -5,-5 -5,5 5,5 5,-5 -5,-5
Mechanical 15:
  circle w0.05: c0,0 r0.35
  lines w0.05: -0.5,0 0.5,0 ; 0,-0.5 0,0.5
  lines w0.1: -6.731,-6.731 -6.731,6.731 6.731,6.731 6.731,-6.731 -6.731,-6.731
3D body "TQFP64 10x10.STEP": height 1.05, standoff -0.01, extent -5.997,-6.002 6.008,6.002

## TQFP64 14x14_L [mm] "64脚，体宽：14x14mm, 脚距：0.8mm"
pads (64):
  oval 0.4x1.5 smd: 1(-6,-7.6) 2(-5.2,-7.6) 3(-4.4,-7.6) 4(-3.6,-7.6) 5(-2.8,-7.6) 6(-2,-7.6) 7(-1.2,-7.6) 8(-0.4,-7.6) 9(0.4,-7.6) 10(1.2,-7.6) 11(2,-7.6) 12(2.8,-7.6) 13(3.6,-7.6) 14(4.4,-7.6) 15(5.2,-7.6) 16(6,-7.6) 33(6,7.6) 34(5.2,7.6) 35(4.4,7.6) 36(3.6,7.6) 37(2.8,7.6) 38(2,7.6) 39(1.2,7.6) 40(0.4,7.6) 41(-0.4,7.6) 42(-1.2,7.6) 43(-2,7.6) 44(-2.8,7.6) 45(-3.6,7.6) 46(-4.4,7.6) 47(-5.2,7.6) 48(-6,7.6)
  oval 1.5x0.4 smd: 17(7.6,-6) 18(7.6,-5.2) 19(7.6,-4.4) 20(7.6,-3.6) 21(7.6,-2.8) 22(7.6,-2) 23(7.6,-1.2) 24(7.6,-0.4) 25(7.6,0.4) 26(7.6,1.2) 27(7.6,2) 28(7.6,2.8) 29(7.6,3.6) 30(7.6,4.4) 31(7.6,5.2) 32(7.6,6) 40(-7.6,5.2) 41(-7.6,4.4) 42(-7.6,3.6) 43(-7.6,2.8) 44(-7.6,2) 45(-7.6,1.2) 46(-7.6,0.4) 47(-7.6,-0.4) 48(-7.6,-1.2) 49(-7.6,-2) 49(-7.6,6) 50(-7.6,-2.8) 51(-7.6,-3.6) 52(-7.6,-4.4) 53(-7.6,-5.2) 54(-7.6,-6)
Top Overlay:
  circle w0.35: c-6.856,-8.001 r0.125
  circle w0.254: c-4.064,-4.064 r1.016
  lines w0.254: -5.842,-5.842 5.842,-5.842 5.842,5.842 -5.842,5.842 -5.842,-5.842
Mechanical 13:
  circle w0.1: c-5.222,-5.222 r1.078
  lines w0.1: -7,-7 -7,7 7,7 7,-7 -7,-7
Mechanical 15:
  circle w0.05: c0,0 r0.35
  lines w0.05: -0.5,0 0.5,0 ; 0,-0.5 0,0.5
  lines w0.1: -8.636,-8.636 8.636,-8.636 8.636,8.636 -8.636,8.636 -8.636,-8.636
3D body "TQFP64 14x14.STEP": height 1.05, standoff -0.01, extent -8.002,-8.002 8.002,8.002

## TQFP64 14x14_M [mm] "64脚，体宽：14x14mm, 脚距：0.8mm"
pads (64):
  oval 0.5x2.1 smd: 1(-6,-7.803) 2(-5.2,-7.803) 3(-4.4,-7.803) 4(-3.6,-7.803) 5(-2.8,-7.803) 6(-2,-7.803) 7(-1.2,-7.803) 8(-0.4,-7.803) 9(0.4,-7.803) 10(1.2,-7.803) 11(2,-7.803) 12(2.8,-7.803) 13(3.6,-7.803) 14(4.4,-7.803) 15(5.2,-7.803) 16(6,-7.803) 33(6,7.803) 34(5.2,7.803) 35(4.4,7.803) 36(3.6,7.803) 37(2.8,7.803) 38(2,7.803) 39(1.2,7.803) 40(0.4,7.803) 41(-0.4,7.803) 42(-1.2,7.803) 43(-2,7.803) 44(-2.8,7.803) 45(-3.6,7.803) 46(-4.4,7.803) 47(-5.2,7.803) 48(-6,7.803)
  oval 2.1x0.5 smd: 17(7.803,-6) 18(7.803,-5.2) 19(7.803,-4.4) 20(7.803,-3.6) 21(7.803,-2.8) 22(7.803,-2) 23(7.803,-1.2) 24(7.803,-0.4) 25(7.803,0.4) 26(7.803,1.2) 27(7.803,2) 28(7.803,2.8) 29(7.803,3.6) 30(7.803,4.4) 31(7.803,5.2) 32(7.803,6) 40(-7.803,5.2) 41(-7.803,4.4) 42(-7.803,3.6) 43(-7.803,2.8) 44(-7.803,2) 45(-7.803,1.2) 46(-7.803,0.4) 47(-7.803,-0.4) 48(-7.803,-1.2) 49(-7.803,-2) 49(-7.803,6) 50(-7.803,-2.8) 51(-7.803,-3.6) 52(-7.803,-4.4) 53(-7.803,-5.2) 54(-7.803,-6)
Top Overlay:
  circle w0.35: c-6.858,-8.509 r0.125
  circle w0.254: c-4.064,-4.064 r1.016
  lines w0.254: -5.842,-5.842 5.842,-5.842 5.842,5.842 -5.842,5.842 -5.842,-5.842
Mechanical 13:
  circle w0.1: c-5.222,-5.222 r1.078
  lines w0.1: -7,-7 -7,7 7,7 7,-7 -7,-7
Mechanical 15:
  circle w0.05: c0,0 r0.35
  lines w0.05: -0.5,0 0.5,0 ; 0,-0.5 0,0.5
  lines w0.1: -9.144,-9.144 9.144,-9.144 9.144,9.144 -9.144,9.144 -9.144,-9.144
3D body "TQFP64 14x14.STEP": height 1.05, standoff -0.01, extent -8.002,-8.002 8.002,8.002